# Altium schematic symbol library IC,MCU,QFN48,STM32G473CBU6.Schlib: 1 symbol
Pins are listed as number, name and electrical type; pins without a type are passive.

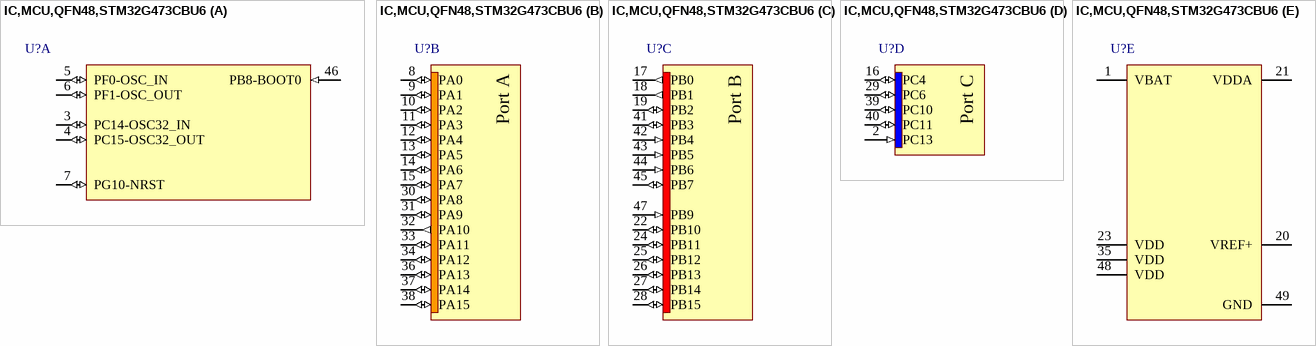
[diagram p0: symbol IC,MCU,QFN48,STM32G473CBU6]

## IC,MCU,QFN48,STM32G473CBU6
designator U?
part A pins: 3 PC14-OSC32_IN (io), 4 PC15-OSC32_OUT (io), 5 PF0-OSC_IN (io), 6 PF1-OSC_OUT (io), 7 PG10-NRST (io), 46 PB8-BOOT0 (in)
part B pins: 8 PA0 (io), 9 PA1 (io), 10 PA2 (io), 11 PA3 (io), 12 PA4 (io), 13 PA5 (io), 14 PA6 (io), 15 PA7 (io), 30 PA8 (io), 31 PA9 (io), 32 PA10 (out), 33 PA11 (io), 34 PA12 (io), 36 PA13 (io), 37 PA14 (io), 38 PA15 (io)
part C pins: 17 PB0 (out), 18 PB1 (out), 19 PB2 (io), 22 PB10 (io), 24 PB11 (io), 25 PB12 (io), 26 PB13 (io), 27 PB14 (io), 28 PB15 (io), 41 PB3 (io), 42 PB4 (in), 43 PB5 (in), 44 PB6 (in), 45 PB7 (io), 47 PB9 (in)
part D pins: 2 PC13 (in), 16 PC4 (io), 29 PC6 (io), 39 PC10 (io), 40 PC11 (io)
part E pins: 1 VBAT (power), 20 VREF+ (power), 21 VDDA (power), 23 VDD (power), 35 VDD (power), 48 VDD (power), 49 GND (power)
part B text: Port A
part C text: Port B
part D text: Port C